# Altium integrated library Gateway_Academic.IntLib: 45 symbols
Pins are listed as number, name and electrical type; pins without a type are passive.

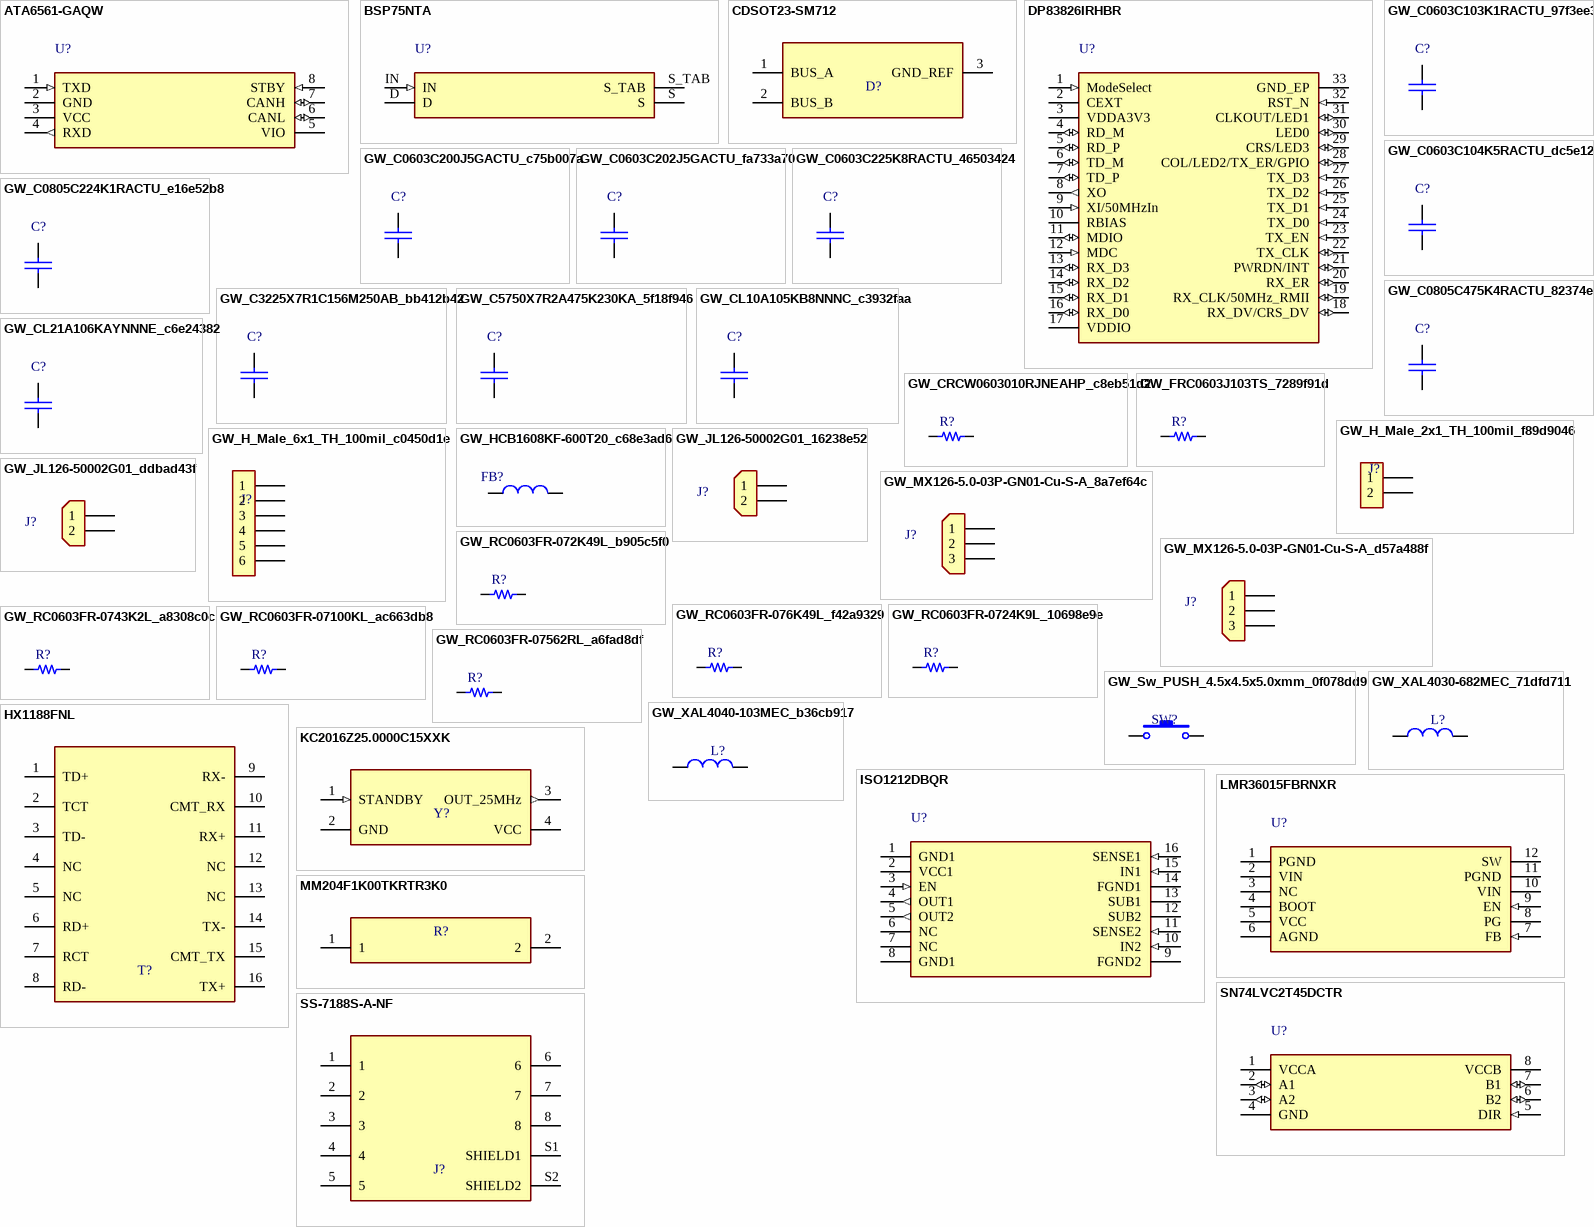
[diagram p0: symbols ATA6561-GAQW to SS-7188S-A-NF]

## ATA6561-GAQW
designator U?  (value not drawn)
ATA6561-GAQW; CAD_CANDIDATE;; Manufacturer: Microchip; Electrical_Status: PROVISIONAL; CAD_Source: DS20005991B pin table p3; C04-2057-OA RevE p19; CAD_Limitations: Circuit not electrically released.; Manufacturer Part Number: ATA6561-GAQW; Value: ATA6561-GAQW; CAD_Status: CAD_CANDIDATE
footprint GW_SOIC8_1P27_5P4
pins: 1 TXD (in), 2 GND (power), 3 VCC (power), 4 RXD (out), 5 VIO (power), 6 CANL (io), 7 CANH (io), 8 STBY (in)

## BSP75NTA
designator U?  (value not drawn)
BSP75NTA; CAD_BLOCKED; CAD_BLOCKED: terminal identifiers are role names, not manufacturer numbers. Tab=Source, isolated from Drain. Need exact numbered Type DN drawing/model before any placement or footprint binding.; Manufacturer: Diodes Incorporated; Electrical_Status: PROVISIONAL; CAD_Source: Diodes DS33016 Rev7-2 pp1,8; terminal numbering absent; Manufacturer Part Number: BSP75NTA; Value: BSP75NTA; CAD_Status: CAD_BLOCKED; CAD_Limitations: CAD_BLOCKED: terminal identifiers are role names, not manufacturer numbers. Tab=Source, isolated from Drain. Need exact numbered Type DN drawing/model before any placement or footprint binding.
pins: D, IN (in), S (power), S_TAB (power)

## CDSOT23-SM712
designator D?
Bourns CDSOT23-SM712 saved2026-11-07 pp1-2 pin diagram and Recommended Footprint; CAD mapping supported; no transferred 1kV surge rating for THVD1420. Populate only after protection qualification.; CAD Status: CAD_CANDIDATE; Manufacturer: Bourns; Manufacturer Part Number: CDSOT23-SM712; Source: Bourns CDSOT23-SM712 saved2026-11-07 pp1-2 pin diagram and Recommended Footprint; Limitations: CAD mapping supported; no transferred 1kV surge rating for THVD1420. Populate only after protection qualification.
footprint GW_SM712_BOURNS
pins: 1 BUS_A, 2 BUS_B, 3 GND_REF

## DP83826IRHBR
designator U?  (value not drawn)
DP83826IRHBR; CAD_CANDIDATE; Multi-function strap pins conservatively bidirectional. Mode not frozen. EP33 must be soldered to ground; thermal vias are board-level optional, filled/plugged/tented if under paste.; Manufacturer: Texas Instruments; Electrical_Status: PROVISIONAL; CAD_Source: SNLS647I table5-1 pp5-6; exposed pad p7; RHB0032M 4223725/A PDF pp111-113; Manufacturer Part Number: DP83826IRHBR; Value: DP83826IRHBR; CAD_Status: CAD_CANDIDATE; CAD_Limitations: Multi-function strap pins conservatively bidirectional. Mode not frozen. EP33 must be soldered to ground; thermal vias are board-level optional, filled/plugged/tented if under paste.
footprint GW_RHB0032M_TI
pins: 1 ModeSelect (in), 2 CEXT, 3 VDDA3V3 (power), 4 RD_M (io), 5 RD_P (io), 6 TD_M (io), 7 TD_P (io), 8 XO (out), 9 XI/50MHzIn (in), 10 RBIAS, 11 MDIO (io), 12 MDC (in), 13 RX_D3 (io), 14 RX_D2 (io), 15 RX_D1 (io), 16 RX_D0 (io), 17 VDDIO (power), 18 RX_DV/CRS_DV (io), 19 RX_CLK/50MHz_RMII (io), 20 RX_ER (io), 21 PWRDN/INT (io), 22 TX_CLK (io), 23 TX_EN (in), 24 TX_D0 (in), 25 TX_D1 (in), 26 TX_D2 (in), 27 TX_D3 (in), 28 COL/LED2/TX_ER/GPIO (io), 29 CRS/LED3 (io), 30 LED0 (io), 31 CLKOUT/LED1 (io), 32 RST_N (in), 33 GND_EP (power)

## GW_C0603C103K1RACTU_97f3ee33
designator C?, comment 10 nF  (value not drawn)
C0603C103K1RACTU; 10 nF; 100 V; X7R; -55..125 C; CAD_CANDIDATE; Manufacturer: KEMET; Tolerance: 10%; Electrical_Status: PROVISIONAL; CAD_Source: Professor_shared.SchLib glyph Cap_0.1uF_0603_50V; CAD_Limitations: Glyph pins/types inspected; exact manufacturer land-pattern/mask/paste qualification pending.; Electrical_Notes: Ficha KEMET local DI_CIN p1; no confundir con externo CL10B103KA8WPNC 25 V. Modelo candidato existente; sin cotejo visual de pads/pines en Altium.; Manufacturer Part Number: C0603C103K1RACTU; Value: 10 nF; Rating: 100 V; X7R; -55..125 C; Power Rating: N/A; Package: 0603; CAD_Status: CAD_CANDIDATE
footprint GW_CAND_0603_cap
pins: 1, 2

## GW_C0603C104K5RACTU_dc5e12a5
designator C?, comment 100 nF  (value not drawn)
C0603C104K5RACTU; 100 nF; 50 V; X7R; -55..125 C; CAD_CANDIDATE; Manufacturer: KEMET; Tolerance: 10%; Electrical_Status: PROVISIONAL; CAD_Source: Professor_shared.SchLib glyph Cap_0.1uF_0603_50V; CAD_Limitations: Glyph pins/types inspected; exact manufacturer land-pattern/mask/paste qualification pending.; Electrical_Notes: Ficha KEMET local p1. Adaptar parametros; no usar el Y5V 0603F104Z500CT como equivalente. Modelo candidato existente; sin cotejo visual de pads/pines en Altium.; Manufacturer Part Number: C0603C104K5RACTU; Value: 100 nF; Rating: 50 V; X7R; -55..125 C; Power Rating: N/A; Package: 0603; CAD_Status: CAD_CANDIDATE
footprint GW_CAND_0603_cap
pins: 1, 2

## GW_C0603C200J5GACTU_c75b007a
designator C?, comment 20 pF  (value not drawn)
C0603C200J5GACTU; 20 pF; 50 V; C0G; CAD_CANDIDATE; Manufacturer: KEMET; Tolerance: 5%; Electrical_Status: PROVISIONAL; CAD_Source: Professor_shared.SchLib glyph Cap_0.1uF_0603_50V; CAD_Limitations: Glyph pins/types inspected; exact manufacturer land-pattern/mask/paste qualification pending.; Electrical_Notes: Valor guia fabricante; validar lazo. Con RFBT100k no obligatorio universal; reservar DNP hasta respuesta/Bode. Modelo candidato existente; sin cotejo visual de pads/pines en Altium.; Manufacturer Part Number: C0603C200J5GACTU; Value: 20 pF; Rating: 50 V; C0G; Power Rating: N/A; Package: 0603; CAD_Status: CAD_CANDIDATE
footprint GW_CAND_0603_cap
pins: 1, 2

## GW_C0603C202J5GACTU_fa733a70
designator C?, comment 2 nF  (value not drawn)
C0603C202J5GACTU; 2 nF; 50 V; C0G; CAD_CANDIDATE; Manufacturer: KEMET; Tolerance: 5% seleccion; Electrical_Status: PROVISIONAL; CAD_Source: Professor_shared.SchLib glyph Cap_0.1uF_0603_50V; CAD_Limitations: Glyph pins/types inspected; exact manufacturer land-pattern/mask/paste qualification pending.; Electrical_Notes: Conflicto EVM C57=100 nF; prevalece requisito actual 2 nF, no copiar C57. Modelo candidato existente; sin cotejo visual de pads/pines en Altium.; Manufacturer Part Number: C0603C202J5GACTU; Value: 2 nF; Rating: 50 V; C0G; Power Rating: N/A; Package: 0603; CAD_Status: CAD_CANDIDATE
footprint GW_CAND_0603_cap
pins: 1, 2

## GW_C0603C225K8RACTU_46503424
designator C?, comment 2.2 uF  (value not drawn)
C0603C225K8RACTU; 2.2 uF; 10 V; X7R; ESR <100 mOhm; CAD_CANDIDATE; Manufacturer: KEMET; Tolerance: 10% candidato; ST permite 20%; Electrical_Status: PROVISIONAL; CAD_Source: Professor_shared.SchLib glyph Cap_0.1uF_0603_50V; CAD_Limitations: Glyph pins/types inspected; exact manufacturer land-pattern/mask/paste qualification pending.; Electrical_Notes: Falta ESR y capacitancia bajo VCORE/temperatura/envejecimiento. No conectar 3.3 V ni carga externa a VCAP. Modelo candidato existente; sin cotejo visual de pads/pines en Altium.; Manufacturer Part Number: C0603C225K8RACTU; Value: 2.2 uF; Rating: 10 V; X7R; ESR <100 mOhm; Power Rating: N/A; Package: 0603; CAD_Status: CAD_CANDIDATE
footprint GW_CAND_0603_cap
pins: 1, 2

## GW_C0805C224K1RACTU_e16e52b8
designator C?, comment 220 nF  (value not drawn)
C0805C224K1RACTU; 220 nF; 100 V; X7R; CAD_CANDIDATE; Manufacturer: KEMET; Tolerance: 10%; Electrical_Status: PROVISIONAL; CAD_Source: Professor_shared.SchLib glyph Cap_10uF_0805_25V_; CAD_Limitations: Glyph pins/types inspected; exact manufacturer land-pattern/mask/paste qualification pending.; Electrical_Notes: Uno por par VIN-PGND en lados opuestos; falta Ceff y cotejo dimensiones pads. Modelo candidato existente; sin cotejo visual de pads/pines en Altium.; Manufacturer Part Number: C0805C224K1RACTU; Value: 220 nF; Rating: 100 V; X7R; Power Rating: N/A; Package: 0805; CAD_Status: CAD_CANDIDATE
footprint GW_CAND_0805_cap
pins: 1, 2

## GW_C0805C475K4RACTU_82374e08
designator C?, comment 4.7 uF  (value not drawn)
C0805C475K4RACTU; 4.7 uF; 16 V; X7R; CAD_CANDIDATE; Manufacturer: KEMET; Tolerance: 10%; Electrical_Status: PROVISIONAL; CAD_Source: Professor_shared.SchLib glyph Cap_10uF_0805_25V_; CAD_Limitations: Glyph pins/types inspected; exact manufacturer land-pattern/mask/paste qualification pending.; Electrical_Notes: Ceff a 3.3 V pendiente; no sustituir por 10 uF solo por disponibilidad. Modelo candidato existente; sin cotejo visual de pads/pines en Altium.; Manufacturer Part Number: C0805C475K4RACTU; Value: 4.7 uF; Rating: 16 V; X7R; Power Rating: N/A; Package: 0805; CAD_Status: CAD_CANDIDATE
footprint GW_CAND_0805_cap
pins: 1, 2

## GW_C3225X7R1C156M250AB_bb412b42
designator C?, comment 15 uF por unidad; 45 uF nominal banco  (value not drawn)
C3225X7R1C156M250AB; 15 uF por unidad; 45 uF nominal banco; 16 V; X7R; CAD_CANDIDATE; Manufacturer: TDK; Tolerance: 20%; CAD_Status: CAD_BLOCKED; Electrical_Status: PROVISIONAL; CAD_Source: Professor_shared.SchLib glyph Cap_0.1uF_0603_50V; CAD_Limitations: Symbol only. Exact manufacturer land pattern absent locally; footprint blocked. Ratings copied from provisional BOM, not newly approved.; Electrical_Notes: Ceff a 3.3 V, ESR, escalon de carga y Bode pendientes. No atribuir 45 uF efectivos ni ESR3.04mOhm del modelo AR. Sin footprint1210 docente.; Manufacturer Part Number: C3225X7R1C156M250AB; Value: 15 uF por unidad; 45 uF nominal banco; Rating: 16 V; X7R; Power Rating: N/A; Package: 1210
pins: 1, 2

## GW_C5750X7R2A475K230KA_5f18f946
designator C?, comment 4.7 uF por unidad; Ceff total >=4.7 uF objetivo conservador  (value not drawn)
C5750X7R2A475K230KA; 4.7 uF por unidad; Ceff total >=4.7 uF objetivo conservador; 100 V; X7R; CAD_CANDIDATE; Manufacturer: TDK; Tolerance: 10%; CAD_Status: CAD_BLOCKED; Electrical_Status: PROVISIONAL; CAD_Source: Professor_shared.SchLib glyph Cap_0.1uF_0603_50V; CAD_Limitations: Symbol only. Exact manufacturer land pattern absent locally; footprint blocked. Ratings copied from provisional BOM, not newly approved.; Electrical_Notes: No fijar cantidad hasta curva bias a30 V+tolerancia+temperatura. 4.7 nominal no garantiza 4.7 efectivo. Carga RMS objetivo >= 0.35 A banco; 2220 no presente profesor.; Manufacturer Part Number: C5750X7R2A475K230KA; Value: 4.7 uF por unidad; Ceff total >=4.7 uF objetivo conservador; Rating: 100 V; X7R; Power Rating: N/A; Package: 2220
pins: 1, 2

## GW_CL10A105KB8NNNC_c3932faa
designator C?, comment 1 uF  (value not drawn)
CL10A105KB8NNNC; 1 uF; 50 V; X5R; -55..85 C; CAD_CANDIDATE; Manufacturer: Samsung Electro-Mechanics; Tolerance: 10%; Electrical_Status: PROVISIONAL; CAD_Source: Professor_shared.SchLib glyph Cap_1uF_0603_50V; CAD_Limitations: Glyph pins/types inspected; exact manufacturer land-pattern/mask/paste qualification pending.; Electrical_Notes: Samsung ficha oficial; Ceff/ESR pendientes por aplicacion. Limite X5R 85 C: no homologado para ambiente superior. Modelo candidato existente; sin cotejo visual de pads/pines en Altium.; Manufacturer Part Number: CL10A105KB8NNNC; Value: 1 uF; Rating: 50 V; X5R; -55..85 C; Power Rating: N/A; Package: 0603; CAD_Status: CAD_CANDIDATE
footprint GW_CAND_0603_cap
pins: 1, 2

## GW_CL21A106KAYNNNE_c6e24382
designator C?, comment 10 uF  (value not drawn)
CL21A106KAYNNNE; 10 uF; 25 V; X5R; -55..85 C; CAD_CANDIDATE; Manufacturer: Samsung Electro-Mechanics; Tolerance: 10%; Electrical_Status: PROVISIONAL; CAD_Source: Professor_shared.SchLib glyph Cap_10uF_0805_25V_; CAD_Limitations: Glyph pins/types inspected; exact manufacturer land-pattern/mask/paste qualification pending.; Electrical_Notes: Ceff a 3.3 V y temperatura pendientes. No usar para entrada 30 V. Modelo candidato existente; sin cotejo visual de pads/pines en Altium.; Manufacturer Part Number: CL21A106KAYNNNE; Value: 10 uF; Rating: 25 V; X5R; -55..85 C; Power Rating: N/A; Package: 0805; CAD_Status: CAD_CANDIDATE
footprint GW_CAND_0805_cap
pins: 1, 2

## GW_CRCW0603010RJNEAHP_c8eb51d2
designator R?, comment 10 Ohm  (value not drawn)
CRCW0603010RJNEAHP; 10 Ohm; Pulse-proof segun ficha exacta; CAD_CANDIDATE; Manufacturer: Vishay; Tolerance: 5%; Power Rating: Pulsos por verificar; Electrical_Status: PROVISIONAL; CAD_Source: Professor_shared.SchLib glyph Res_10k_0603_1/10W; CAD_Limitations: Glyph pins/types inspected; exact manufacturer land-pattern/mask/paste qualification pending.; Electrical_Notes: Referencia usa THVD1400 a5 V. No valida THVD1420/3.3V/12Mbps: verificar VOD tras20Ohm, residuales clamp, pulsos y timing. Modelo candidato existente; sin cotejo visual de pads/pines en Altium.; Manufacturer Part Number: CRCW0603010RJNEAHP; Value: 10 Ohm; Rating: Pulse-proof segun ficha exacta; Package: 0603; CAD_Status: CAD_CANDIDATE
footprint GW_CAND_0603_res
pins: 1, 2

## GW_FRC0603J103TS_7289f91d
designator R?, comment 10 kOhm  (value not drawn)
FRC0603J103TS; 10 kOhm; >= 3.3 V; tension de trabajo por verificar; CAD_CANDIDATE; Manufacturer: FOJAN; Tolerance: 5%; Power Rating: 0.1 W; Electrical_Status: PROVISIONAL; CAD_Source: Professor_shared.SchLib glyph Res_10k_0603_1/10W; CAD_Limitations: Glyph pins/types inspected; exact manufacturer land-pattern/mask/paste qualification pending.; Electrical_Notes: Ratings transcritos del CAD; falta ficha FOJAN. Alternativa RC0603FR-0710KL con ficha oficial local, mismo footprint candidato. Modelo candidato existente; sin cotejo visual de pads/pines en Altium.; Manufacturer Part Number: FRC0603J103TS; Value: 10 kOhm; Rating: >= 3.3 V; tension de trabajo por verificar; Package: 0603; CAD_Status: CAD_CANDIDATE
footprint GW_CAND_0603_res
pins: 1, 2

## GW_H_Male_2x1_TH_100mil_f89d9046
designator J?, comment 2 posiciones  (value not drawn)
TBD; 2 posiciones; TBD; CAD_CANDIDATE; Manufacturer: UNVERIFIED; see original candidate BOM; Electrical_Status: PROVISIONAL; CAD_Source: Professor_shared.SchLib glyph H_Male_2x1_TH_100mil; CAD_Limitations: Glyph pins/types inspected; exact manufacturer land-pattern/mask/paste qualification pending.; Electrical_Notes: Pinout, MPN y orientacion pendientes. No alimentar VDD desde VTref; SWD PA13/PA14 y NRST. Modelo candidato existente; sin cotejo visual de pads/pines en Altium.; Manufacturer Part Number: TBD; Value: 2 posiciones; Tolerance: TBD; Rating: TBD; Power Rating: N/A; Package: TBD; CAD_Status: CAD_CANDIDATE
footprint GW_CAND_H_2x1_TH_100mil
pins: 1, 2

## GW_H_Male_6x1_TH_100mil_c0450d1e
designator J?, comment 6 posiciones  (value not drawn)
TBD; 6 posiciones; TBD; CAD_CANDIDATE; Manufacturer: UNVERIFIED; see original candidate BOM; Electrical_Status: PROVISIONAL; CAD_Source: Professor_shared.SchLib glyph H_Male_6x1_TH_100mil; CAD_Limitations: Glyph pins/types inspected; exact manufacturer land-pattern/mask/paste qualification pending.; Electrical_Notes: Pinout, MPN y orientacion pendientes. No alimentar VDD desde VTref; SWD PA13/PA14 y NRST. Modelo candidato existente; sin cotejo visual de pads/pines en Altium.; Manufacturer Part Number: TBD; Value: 6 posiciones; Tolerance: TBD; Rating: TBD; Power Rating: N/A; Package: TBD; CAD_Status: CAD_CANDIDATE
footprint GW_CAND_H_6x1_TH_100mil
pins: 1, 2, 3, 4, 5, 6

## GW_HCB1608KF-600T20_c68e3ad6
designator FB?, comment 60 Ohm @100 MHz candidato  (value not drawn)
HCB1608KF-600T20; 60 Ohm @100 MHz candidato; 2 A; DCR 100 mOhm segun CAD; CAD_CANDIDATE; Manufacturer: UNVERIFIED; see original candidate BOM; Tolerance: 25%; Electrical_Status: PROVISIONAL; CAD_Source: Professor_shared.SchLib glyph FB_60_0603_2A; CAD_Limitations: Glyph pins/types inspected; exact manufacturer land-pattern/mask/paste qualification pending.; Electrical_Notes: No exigir filtro adicional sin EMC; verificar curva de impedancia y resonancia con banco local si se monta. Modelo candidato existente; sin cotejo visual de pads/pines en Altium.; Manufacturer Part Number: HCB1608KF-600T20; Value: 60 Ohm @100 MHz candidato; Rating: 2 A; DCR 100 mOhm segun CAD; Power Rating: N/A; Package: 0603; CAD_Status: CAD_CANDIDATE
footprint GW_CAND_0603_fb
pins: 1, 2

## GW_JL126-50002G01_16238e52
designator J?, comment 2 polos + politica PE  (value not drawn)
JL126-50002G01; 2 polos + politica PE; >=30 V continuo mas transitorios; corriente TBD; CAD_CANDIDATE; Manufacturer: UNVERIFIED; see original candidate BOM; Electrical_Status: PROVISIONAL; CAD_Source: Professor_shared.SchLib glyph Con_2x1_TH_5mm; CAD_Limitations: Professor pads have Y offset 0.127mm: pin1 y=.254, pin2 y=.127. Exact JL126 drawing required; footprint retained as explicitly unverified candidate.; Electrical_Notes: Priorizar bornera docente tras MPN/tension/corriente/taladros, no jack ambiguo2.0/2.1 mm. Modelo candidato existente; sin cotejo visual de pads/pines en Altium.; Manufacturer Part Number: JL126-50002G01; Value: 2 polos + politica PE; Tolerance: TBD; Rating: >=30 V continuo mas transitorios; corriente TBD; Power Rating: N/A; Package: TBD; CAD_Status: CAD_CANDIDATE
footprint GW_CAND_CON_2x1_TH_5MM
pins: 1, 2

## GW_JL126-50002G01_ddbad43f
designator J?, comment 2 polos por canal  (value not drawn)
JL126-50002G01; 2 polos por canal; >=30 V y0.5 A/canal mas fallas; CAD_CANDIDATE; Manufacturer: UNVERIFIED; see original candidate BOM; Tolerance: TBD; Electrical_Status: PROVISIONAL; CAD_Source: Professor_shared.SchLib glyph Con_2x1_TH_5mm; CAD_Limitations: Professor pads have Y offset 0.127mm: pin1 y=.254, pin2 y=.127. Exact JL126 drawing required; footprint retained as explicitly unverified candidate.; Electrical_Notes: Priorizar bornera docente; source/tab a retorno campo; no terminal high-side. Retornos1A fuera GND analogico. Modelo candidato existente; sin cotejo visual de pads/pines en Altium.; Manufacturer Part Number: JL126-50002G01; Value: 2 polos por canal; Rating: >=30 V y0.5 A/canal mas fallas; Power Rating: N/A; Package: TBD; CAD_Status: CAD_CANDIDATE
footprint GW_CAND_CON_2x1_TH_5MM
pins: 1, 2

## GW_MX126-5.0-03P-GN01-Cu-S-A_8a7ef64c
designator J?, comment 3 polos si COM comun  (value not drawn)
MX126-5.0-03P-GN01-Cu-S-A; 3 polos si COM comun; TBD; CAD_CANDIDATE; Manufacturer: UNVERIFIED; see original candidate BOM; Electrical_Status: PROVISIONAL; CAD_Source: Professor_shared.SchLib glyph Con_3x1_TH_5mm; CAD_Limitations: Glyph pins/types inspected; exact manufacturer land-pattern/mask/paste qualification pending.; Electrical_Notes: Aislamiento de grupo o por canal pendiente. SUB1/SUB2 NC; FGND noGND1. EN definido aVCC1 si salidas permanentes, sin resistor necesario. Modelo candidato existente; sin cotejo visual de pads/pines en Altium.; Manufacturer Part Number: MX126-5.0-03P-GN01-Cu-S-A; Value: 3 polos si COM comun; Tolerance: TBD; Rating: TBD; Power Rating: N/A; Package: TBD; CAD_Status: CAD_CANDIDATE
footprint GW_CAND_CON_3x1_TH_5mm
pins: 1, 2, 3

## GW_MX126-5.0-03P-GN01-Cu-S-A_d57a488f
designator J?, comment 3 polos  (value not drawn)
MX126-5.0-03P-GN01-Cu-S-A; 3 polos; TBD; CAD_CANDIDATE; Manufacturer: UNVERIFIED; see original candidate BOM; Electrical_Status: PROVISIONAL; CAD_Source: Professor_shared.SchLib glyph Con_3x1_TH_5mm; CAD_Limitations: Glyph pins/types inspected; exact manufacturer land-pattern/mask/paste qualification pending.; Electrical_Notes: Ratings, corrientes de falla, pinout y referencia comun pendientes; no asumir aislamiento galvanico. Modelo candidato existente; sin cotejo visual de pads/pines en Altium.; Manufacturer Part Number: MX126-5.0-03P-GN01-Cu-S-A; Value: 3 polos; Tolerance: TBD; Rating: TBD; Power Rating: N/A; Package: TBD; CAD_Status: CAD_CANDIDATE
footprint GW_CAND_CON_3x1_TH_5mm
pins: 1, 2, 3

## GW_RC0603FR-072K49L_b905c5f0
designator R?, comment 2.49 kOhm  (value not drawn)
RC0603FR-072K49L; 2.49 kOhm; 75 V max; limite sqrt(P*R); CAD_CANDIDATE; Manufacturer: Yageo; Tolerance: 1%; Power Rating: 0.1 W @70 C; Electrical_Status: PROVISIONAL; CAD_Source: Professor_shared.SchLib glyph Res_10k_0603_1/10W; CAD_Limitations: Glyph pins/types inspected; exact manufacturer land-pattern/mask/paste qualification pending.; Electrical_Notes: Candidato ENHANCED/RMII leader: ModeSelect NC, strap1=1 default, strap8=1, strap5=0 default. Ver tabla del informe; sin LEDs de straps. Modelo candidato existente; sin cotejo visual de pads/pines en Altium.; Manufacturer Part Number: RC0603FR-072K49L; Value: 2.49 kOhm; Rating: 75 V max; limite sqrt(P*R); Package: 0603; CAD_Status: CAD_CANDIDATE
footprint GW_CAND_0603_res
pins: 1, 2

## GW_RC0603FR-076K49L_f42a9329
designator R?, comment 6.49 kOhm  (value not drawn)
RC0603FR-076K49L; 6.49 kOhm; 75 V max; limite sqrt(P*R); CAD_CANDIDATE; Manufacturer: Yageo; Tolerance: 1%; Power Rating: 0.1 W @70 C; Electrical_Status: PROVISIONAL; CAD_Source: Professor_shared.SchLib glyph Res_10k_0603_1/10W; CAD_Limitations: Glyph pins/types inspected; exact manufacturer land-pattern/mask/paste qualification pending.; Electrical_Notes: P<3.3^2/6490=1.68 mW; actualizacion de valor/MPN sobre simbolo generico pendiente. Modelo candidato existente; sin cotejo visual de pads/pines en Altium.; Manufacturer Part Number: RC0603FR-076K49L; Value: 6.49 kOhm; Rating: 75 V max; limite sqrt(P*R); Package: 0603; CAD_Status: CAD_CANDIDATE
footprint GW_CAND_0603_res
pins: 1, 2

## GW_RC0603FR-0724K9L_10698e9e
designator R?, comment 24.9 kOhm  (value not drawn)
RC0603FR-0724K9L; 24.9 kOhm; 75 V max; limite sqrt(P*R); CAD_CANDIDATE; Manufacturer: Yageo; Tolerance: 1%; Power Rating: 0.1 W @70 C; Electrical_Status: PROVISIONAL; CAD_Source: Professor_shared.SchLib glyph Res_10k_0603_1/10W; CAD_Limitations: Glyph pins/types inspected; exact manufacturer land-pattern/mask/paste qualification pending.; Electrical_Notes: Vout nominal calculado 5.01606 V; ver esquinas de tolerancia. Cambiar parametros en copia docente. Modelo candidato existente; sin cotejo visual de pads/pines en Altium.; Manufacturer Part Number: RC0603FR-0724K9L; Value: 24.9 kOhm; Rating: 75 V max; limite sqrt(P*R); Package: 0603; CAD_Status: CAD_CANDIDATE
footprint GW_CAND_0603_res
pins: 1, 2

## GW_RC0603FR-0743K2L_a8308c0c
designator R?, comment 43.2 kOhm  (value not drawn)
RC0603FR-0743K2L; 43.2 kOhm; 75 V max; limite sqrt(P*R); CAD_CANDIDATE; Manufacturer: Yageo; Tolerance: 1%; Power Rating: 0.1 W @70 C; Electrical_Status: PROVISIONAL; CAD_Source: Professor_shared.SchLib glyph Res_10k_0603_1/10W; CAD_Limitations: Glyph pins/types inspected; exact manufacturer land-pattern/mask/paste qualification pending.; Electrical_Notes: Vout nominal calculado 3.31481 V; ver esquinas de tolerancia. Cambiar parametros en copia docente. Modelo candidato existente; sin cotejo visual de pads/pines en Altium.; Manufacturer Part Number: RC0603FR-0743K2L; Value: 43.2 kOhm; Rating: 75 V max; limite sqrt(P*R); Package: 0603; CAD_Status: CAD_CANDIDATE
footprint GW_CAND_0603_res
pins: 1, 2

## GW_RC0603FR-07100KL_ac663db8
designator R?, comment 100 kOhm  (value not drawn)
RC0603FR-07100KL; 100 kOhm; 75 V max; limite sqrt(P*R); CAD_CANDIDATE; Manufacturer: Yageo; Tolerance: 1%; Power Rating: 0.1 W @70 C; Electrical_Status: PROVISIONAL; CAD_Source: Professor_shared.SchLib glyph Res_10k_0603_1/10W; CAD_Limitations: Glyph pins/types inspected; exact manufacturer land-pattern/mask/paste qualification pending.; Electrical_Notes: Vout nominal calculado 3.31481 V; ver esquinas de tolerancia. Cambiar parametros en copia docente. Modelo candidato existente; sin cotejo visual de pads/pines en Altium.; Manufacturer Part Number: RC0603FR-07100KL; Value: 100 kOhm; Rating: 75 V max; limite sqrt(P*R); Package: 0603; CAD_Status: CAD_CANDIDATE
footprint GW_CAND_0603_res
pins: 1, 2

## GW_RC0603FR-07562RL_a6fad8df
designator R?, comment 562 Ohm  (value not drawn)
RC0603FR-07562RL; 562 Ohm; 75 V max; limite sqrt(P*R); CAD_CANDIDATE; Manufacturer: Yageo; Tolerance: 1%; Power Rating: 0.1 W @70 C; Electrical_Status: PROVISIONAL; CAD_Source: Professor_shared.SchLib glyph Res_10k_0603_1/10W; CAD_Limitations: Glyph pins/types inspected; exact manufacturer land-pattern/mask/paste qualification pending.; Electrical_Notes: Ityp2.25mA; P conservadora a2.75mA=4.30mW. No es resistor de24V completos; corriente de campo separada deVCC1. Modelo candidato existente; sin cotejo visual de pads/pines en Altium.; Manufacturer Part Number: RC0603FR-07562RL; Value: 562 Ohm; Rating: 75 V max; limite sqrt(P*R); Package: 0603; CAD_Status: CAD_CANDIDATE
footprint GW_CAND_0603_res
pins: 1, 2

## GW_Sw_PUSH_4.5x4.5x5.0xmm_0f078dd9
designator SW?, comment SPST-NO  (value not drawn)
TBD; SPST-NO; TBD; CAD_CANDIDATE; Manufacturer: UNVERIFIED; see original candidate BOM; CAD_Status: CAD_BLOCKED; Electrical_Status: PROVISIONAL; CAD_Source: Professor_shared.SchLib glyph Sw_PUSH_4.5x4.5x5.0xmm; CAD_Limitations: Footprint unfinished: paired pads 1/1 and 2/2 in professor source are rejected by official writer duplicate-designator validation. Exact switch MPN/terminal-pairing drawing and native copy verification required. No pad renumbering invented.; Electrical_Notes: Pinout, MPN y orientacion pendientes. No alimentar VDD desde VTref; SWD PA13/PA14 y NRST. Modelo candidato existente; sin cotejo visual de pads/pines en Altium.; Manufacturer Part Number: TBD; Value: SPST-NO; Tolerance: TBD; Rating: TBD; Power Rating: N/A; Package: TBD
pins: 1, 2

## GW_XAL4030-682MEC_71dfd711
designator L?, comment 6.8 uH  (value not drawn)
XAL4030-682MEC; 6.8 uH; Isat25C 3.6 A; Irms20C 3.0 A; CAD_CANDIDATE; Manufacturer: Coilcraft; Tolerance: 20%; CAD_Status: CAD_BLOCKED; Electrical_Status: PROVISIONAL; CAD_Source: Professor_shared.SchLib glyph Inductor_10uH_4A_7.2*6.6mm; CAD_Limitations: Symbol only. Exact manufacturer land pattern absent locally; footprint blocked. Ratings copied from provisional BOM, not newly approved.; Electrical_Notes: DCRmax25C 74.1 mOhm. Isat es caida30% tipica; falta derating caliente/curva L(I)/perdidas nucleo y CAD. No usar inductor docente sin Isat verificable.; Manufacturer Part Number: XAL4030-682MEC; Value: 6.8 uH; Rating: Isat25C 3.6 A; Irms20C 3.0 A; Power Rating: N/A; Package: XAL4030
pins: 1, 2

## GW_XAL4040-103MEC_b36cb917
designator L?, comment 10 uH  (value not drawn)
XAL4040-103MEC; 10 uH; Isat25C 3.0 A; Irms20C 2.2 A; CAD_CANDIDATE; Manufacturer: Coilcraft; Tolerance: 20%; CAD_Status: CAD_BLOCKED; Electrical_Status: PROVISIONAL; CAD_Source: Professor_shared.SchLib glyph Inductor_10uH_4A_7.2*6.6mm; CAD_Limitations: Symbol only. Exact manufacturer land pattern absent locally; footprint blocked. Ratings copied from provisional BOM, not newly approved.; Electrical_Notes: DCRmax25C 92.4 mOhm. Isat es caida30% tipica; falta derating caliente/curva L(I)/perdidas nucleo y CAD. No usar inductor docente sin Isat verificable.; Manufacturer Part Number: XAL4040-103MEC; Value: 10 uH; Rating: Isat25C 3.0 A; Irms20C 2.2 A; Power Rating: N/A; Package: XAL4040
pins: 1, 2

## HX1188FNL
designator T?
Pulse HX1188FNL revB 30-May-2014 sheets2-3 PS-2005.002-D; Use exact winding map; NC4,5,12,13 remain unconnected. FNLT is packaging variant; selected MPN FNL.; Manufacturer: Pulse Electronics; CAD Status: CAD_CANDIDATE; Manufacturer Part Number: HX1188FNL; Source: Pulse HX1188FNL revB 30-May-2014 sheets2-3 PS-2005.002-D; Limitations: Use exact winding map; NC4,5,12,13 remain unconnected. FNLT is packaging variant; selected MPN FNL.
footprint GW_HX1188FNL_PULSE
pins: 1 TD+, 2 TCT, 3 TD-, 4 NC, 5 NC, 6 RD+, 7 RCT, 8 RD-, 9 RX-, 10 CMT_RX, 11 RX+, 12 NC, 13 NC, 14 TX-, 15 CMT_TX, 16 TX+

## ISO1212DBQR
designator U?  (value not drawn)
ISO1212DBQR; CAD_CANDIDATE; SUB12 and SUB13 must remain separate floating nets. TI recommends an individual 2x2mm floating copper island for each; these board-level islands are NOT encoded in this package footprint. Never join to either FGND, GND1 or each; Manufacturer: Texas Instruments; Electrical_Status: PROVISIONAL; CAD_Source: SLLSEY7G table4-2 p4; DBQ0016A 4214846/A PDF pp44-46; CAD_Limitations: SUB12 and SUB13 must remain separate floating nets. TI recommends an individual 2x2mm floating copper island for each; these board-level islands are NOT encoded in this package footprint. Never join to either FGND, GND1 or each other. NC6/7 unconnected.; Manufacturer Part Number: ISO1212DBQR; Value: ISO1212DBQR; CAD_Status: CAD_CANDIDATE
footprint GW_DBQ0016A_TI
pins: 1 GND1 (power), 2 VCC1 (power), 3 EN (in), 4 OUT1 (out), 5 OUT2 (out), 6 NC, 7 NC, 8 GND1 (power), 9 FGND2 (power), 10 IN2 (in), 11 SENSE2 (in), 12 SUB2, 13 SUB1, 14 FGND1 (power), 15 IN1 (in), 16 SENSE1 (in)

## KC2016Z25.0000C15XXK
designator Y?
Kyocera TNY1T-H1-DEX01-11 17-Jul-2026 pp4,6 table2 fig4; Two independent oscillators proposed; 10nF per supply. Tie1 to3V3. Load<=15pF and PHY phase-noise qualification pending.; Manufacturer Part Number: KC2016Z25.0000C15XXK; CAD Status: CAD_CANDIDATE; Manufacturer: Kyocera; Source: Kyocera TNY1T-H1-DEX01-11 17-Jul-2026 pp4,6 table2 fig4; Limitations: Two independent oscillators proposed; 10nF per supply. Tie1 to3V3. Load<=15pF and PHY phase-noise qualification pending.
footprint GW_KC2016Z_KYOCERA
pins: 1 STANDBY (in), 2 GND (power), 3 OUT_25MHz (out), 4 VCC (power)

## LMR36015FBRNXR
designator U?  (value not drawn)
LMR36015FBRNXR; CAD_CANDIDATE; CAD_CANDIDATE: confirm delivered RNX revision A/B. NC3 is externally connected to SW per TI. RNX12 is SW, not a ground exposed pad. Two footprint variants retained.; Manufacturer: Texas Instruments; Electrical_Status: PROVISIONAL; CAD_Source: SNVSB49D p4; RNX0012A 4222858/A PDF pp44-46 and RNX0012B 4223969/C pp47-49; Manufacturer Part Number: LMR36015FBRNXR; Value: LMR36015FBRNXR; CAD_Status: CAD_CANDIDATE; CAD_Limitations: CAD_CANDIDATE: confirm delivered RNX revision A/B. NC3 is externally connected to SW per TI. RNX12 is SW, not a ground exposed pad. Two footprint variants retained.
footprint GW_RNX0012A_TI
footprint GW_RNX0012B_TI
pins: 1 PGND (power), 2 VIN (power), 3 NC, 4 BOOT (power), 5 VCC (power), 6 AGND (power), 7 FB (in), 8 PG (oc), 9 EN (in), 10 VIN (power), 11 PGND (power), 12 SW (power)

## MM204F1K00TKRTR3K0
designator R?
Firstohm MM rev08-March-2023 printedpp75-78; p78 reflow pad table MM16/MM204; 1kOhm1%,0.25W@70C; normal Type3 operation supported. 500V/1kV system surge withstand NOT established.; Manufacturer Part Number: MM204F1K00TKRTR3K0; CAD Status: CAD_CANDIDATE; Manufacturer: Firstohm; Source: Firstohm MM rev08-March-2023 printedpp75-78; p78 reflow pad table MM16/MM204; Limitations: 1kOhm1%,0.25W@70C; normal Type3 operation supported. 500V/1kV system surge withstand NOT established.
footprint GW_MM204_FIRSTOHM
pins: 1, 2

## SN74LVC2T45DCTR
designator U?  (value not drawn)
SN74LVC2T45DCTR; CAD_CANDIDATE; Electrical candidate only; no OE pin. VOH at BSP75N input load remains open.; Manufacturer: Texas Instruments; Electrical_Status: PROVISIONAL; CAD_Source: SCES516N table4-1 p2; DCT0008A 4220784/D PDF pp28-30; Manufacturer Part Number: SN74LVC2T45DCTR; Value: SN74LVC2T45DCTR; CAD_Status: CAD_CANDIDATE; CAD_Limitations: Electrical candidate only; no OE pin. VOH at BSP75N input load remains open.
footprint GW_DCT0008A_TI
pins: 1 VCCA (power), 2 A1 (io), 3 A2 (io), 4 GND (power), 5 DIR (in), 6 B2 (io), 7 B1 (io), 8 VCCB (power)

## SS-7188S-A-NF
designator J?
Cinch/Stewart CT710001 revB0 10-Jul-2023 component-side recommended hole layout; Numbered contacts per component-side drawing. S1/S2 are project labels for unnumbered shield tabs; MP1/2 are non-electrical mounting holes. Candidate copper lands; sourcing risk separate.; Manufacturer Part Number: SS-7188S-A-NF; CAD Status: CAD_CANDIDATE; Manufacturer: Cinch / Stewart; Source: Cinch/Stewart CT710001 revB0 10-Jul-2023 component-side recommended hole layout; Limitations: Numbered contacts per component-side drawing. S1/S2 are project labels for unnumbered shield tabs; MP1/2 are non-electrical mounting holes. Candidate copper lands; sourcing risk separate.
footprint GW_SS7188SANF_STEWART
pins: 1, 2, 3, 4, 5, 6, 7, 8, S1 SHIELD1, S2 SHIELD2

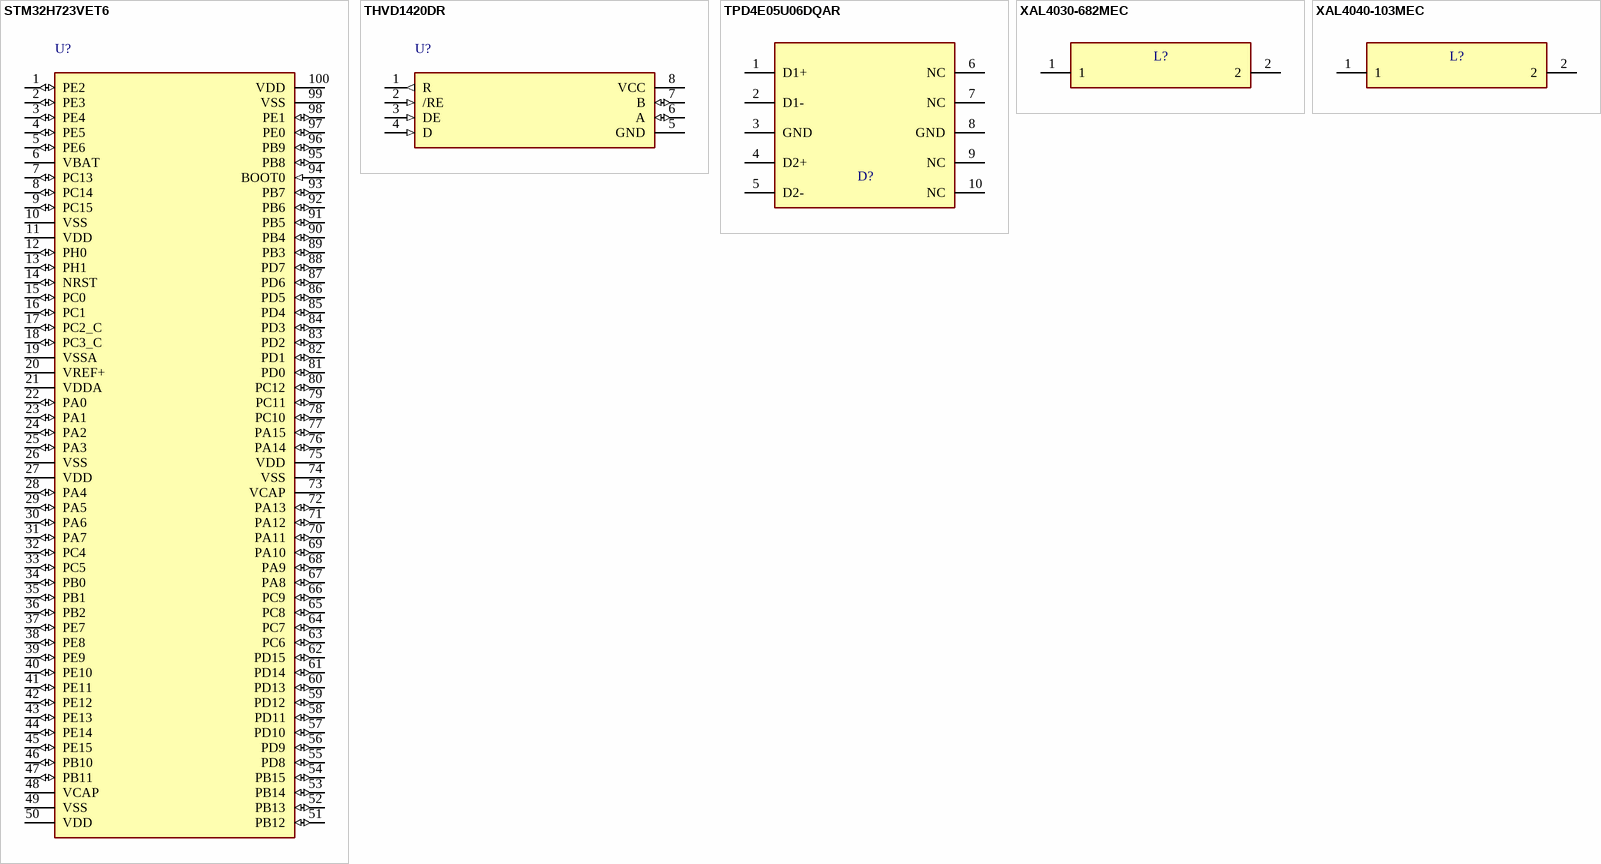
[diagram p1: symbols STM32H723VET6 to XAL4040-103MEC]

## STM32H723VET6
designator U?  (value not drawn)
STM32H723VET6; CAD_CANDIDATE; GPIOs use bidirectional ERC type; oscillator pins have dedicated types. VCAP power pins are LDO outputs, never connect to VDD.; Manufacturer: STMicroelectronics; Electrical_Status: PROVISIONAL; CAD_Source: DS13313 Rev5 fig5, table7 pp57-71, fig65 p218 (PDF p219); Manufacturer Part Number: STM32H723VET6; Value: STM32H723VET6; CAD_Status: CAD_CANDIDATE; CAD_Limitations: GPIOs use bidirectional ERC type; oscillator pins have dedicated types. VCAP power pins are LDO outputs, never connect to VDD.
footprint GW_LQFP100_ST_1L
pins: 1 PE2 (io), 2 PE3 (io), 3 PE4 (io), 4 PE5 (io), 5 PE6 (io), 6 VBAT (power), 7 PC13 (io), 8 PC14 (io), 9 PC15 (io), 10 VSS (power), 11 VDD (power), 12 PH0 (io), 13 PH1 (io), 14 NRST (io), 15 PC0 (io), 16 PC1 (io), 17 PC2_C (io), 18 PC3_C (io), 19 VSSA (power), 20 VREF+ (power), 21 VDDA (power), 22 PA0 (io), 23 PA1 (io), 24 PA2 (io), 25 PA3 (io), 26 VSS (power), 27 VDD (power), 28 PA4 (io), 29 PA5 (io), 30 PA6 (io), 31 PA7 (io), 32 PC4 (io), 33 PC5 (io), 34 PB0 (io), 35 PB1 (io), 36 PB2 (io), 37 PE7 (io), 38 PE8 (io), 39 PE9 (io), 40 PE10 (io), 41 PE11 (io), 42 PE12 (io), 43 PE13 (io), 44 PE14 (io), 45 PE15 (io), 46 PB10 (io), 47 PB11 (io), 48 VCAP (power), 49 VSS (power), 50 VDD (power), 51 PB12 (io), 52 PB13 (io), 53 PB14 (io), 54 PB15 (io), 55 PD8 (io), 56 PD9 (io), 57 PD10 (io), 58 PD11 (io), 59 PD12 (io), 60 PD13 (io), 61 PD14 (io), 62 PD15 (io), 63 PC6 (io), 64 PC7 (io), 65 PC8 (io), 66 PC9 (io), 67 PA8 (io), 68 PA9 (io), 69 PA10 (io), 70 PA11 (io), 71 PA12 (io), 72 PA13 (io), 73 VCAP (power), 74 VSS (power), 75 VDD (power), 76 PA14 (io), 77 PA15 (io), 78 PC10 (io), 79 PC11 (io), 80 PC12 (io), 81 PD0 (io), 82 PD1 (io), 83 PD2 (io), 84 PD3 (io), 85 PD4 (io), 86 PD5 (io), 87 PD6 (io), 88 PD7 (io), 89 PB3 (io), 90 PB4 (io), 91 PB5 (io), 92 PB6 (io), 93 PB7 (io), 94 BOOT0 (in), 95 PB8 (io), 96 PB9 (io), 97 PE0 (io), 98 PE1 (io), 99 VSS (power), 100 VDD (power)

## THVD1420DR
designator U?  (value not drawn)
THVD1420DR; CAD_CANDIDATE;; Manufacturer: Texas Instruments; Electrical_Status: PROVISIONAL; CAD_Source: SLLSF78B table4-1 p3; D0008A 4214825/C PDF pp30-32; CAD_Limitations: Circuit not electrically released.; Manufacturer Part Number: THVD1420DR; Value: THVD1420DR; CAD_Status: CAD_CANDIDATE
footprint GW_SOIC8_1P27_5P4
pins: 1 R (out), 2 /RE (in), 3 DE (in), 4 D (in), 5 GND (power), 6 A (io), 7 B (io), 8 VCC (power)

## TPD4E05U06DQAR
designator D?
TI SLVSBO7O table4-2 p4; DQA0010A 4220328/A board/stencil pp29-30; PHY-side only, per DP83826EVM sheet3. GND3/8 to logic GND. NC6/7/9/10 may be pass-through pads; preserve isolation.; Manufacturer: Texas Instruments; Manufacturer Part Number: TPD4E05U06DQAR; CAD Status: CAD_CANDIDATE; Source: TI SLVSBO7O table4-2 p4; DQA0010A 4220328/A board/stencil pp29-30; Limitations: PHY-side only, per DP83826EVM sheet3. GND3/8 to logic GND. NC6/7/9/10 may be pass-through pads; preserve isolation.
footprint GW_DQA0010A_TI
pins: 1 D1+, 2 D1-, 3 GND (power), 4 D2+, 5 D2-, 6 NC, 7 NC, 8 GND (power), 9 NC, 10 NC

## XAL4030-682MEC
designator L?
Coilcraft document806-4 revised02/25/26 Recommended Land Pattern; Nonpolar winding; pin1=marked high-dv/dt end by project convention. Full load/hot Isat and loss qualification pending.; Manufacturer Part Number: XAL4030-682MEC; CAD Status: CAD_CANDIDATE; Manufacturer: Coilcraft; Source: Coilcraft document806-4 revised02/25/26 Recommended Land Pattern; Limitations: Nonpolar winding; pin1=marked high-dv/dt end by project convention. Full load/hot Isat and loss qualification pending.
footprint GW_XAL4030_COILCRAFT
pins: 1, 2

## XAL4040-103MEC
designator L?
Coilcraft document806-4 revised02/25/26 Recommended Land Pattern; Nonpolar winding; pin1=marked high-dv/dt end by project convention. Full load/hot Isat and loss qualification pending.; Manufacturer Part Number: XAL4040-103MEC; CAD Status: CAD_CANDIDATE; Manufacturer: Coilcraft; Source: Coilcraft document806-4 revised02/25/26 Recommended Land Pattern; Limitations: Nonpolar winding; pin1=marked high-dv/dt end by project convention. Full load/hot Isat and loss qualification pending.
footprint GW_XAL4040_COILCRAFT
pins: 1, 2